# EAGLE library part LTC6820IMS#3ZZPBF (library LTC6820IMS#3ZZPBF)
Isolated Communications Interface Interface 16-MSOP Source: Datasheet <http://www.linear.com/docs/42317>
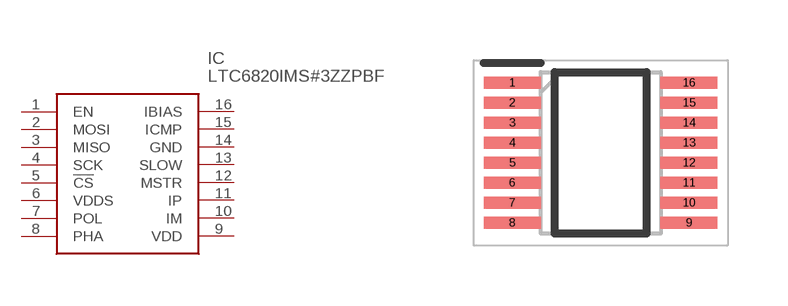
[diagram p0: symbol with the pads of SOP50P490X110-16N; footprint SOP50P490X110-16N]

Designator prefix IC

## LTC6820IMS#3ZZPBF (Description: Isolated Communications Interface Interface 16-MSOP; Height: 1.1mm; Manufacturer_Name: Analog Devices; Manufacturer_Part_Number: LTC6820IMS#3ZZPBF; Mouser_Part_Number: 584-6820IMS#3ZZPB; Mouser_Price-Stock: https://www.mouser.co.uk/ProductDetail/Analog-Devices/LTC6820IMS3ZZPBF?qs=byeeYqUIh0N8RiK1UGlHvA%3D%3D)  [SOP50P490X110-16N]
1  EN
2  MOSI
3  MISO
4  SCK
5  !CS
6  VDDS
7  POL
8  PHA
9  VDD
10  IM
11  IP
12  MSTR
13  SLOW
14  GND
15  ICMP
16  IBIAS

## Footprint SOP50P490X110-16N (pad centres in mm)
MS Package 16-Lead 1Plastic MSOP
smd 1.425 x 0.3: 1 -2.212,1.75; 2 -2.212,1.25; 3 -2.212,0.75; 4 -2.212,0.25; 5 -2.212,-0.25; 6 -2.212,-0.75; 7 -2.212,-1.25; 8 -2.212,-1.75; 9 2.212,-1.75; 10 2.212,-1.25; 11 2.212,-0.75; 12 2.212,-0.25; 13 2.212,0.25; 14 2.212,0.75; 15 2.212,1.25; 16 2.212,1.75